# Altium footprint library PBL - THD Packages.PcbLib: 160 footprints (part 4 of 10)
Each footprint in its own frame and in the unit in brackets; x right, y up, seen from the top. Pads: shape width x height; smd on the part's side, far side on the other; paste and mask are expansions set on the pad; w line width, h text height; cw(c..) or ccw(c..) is an arc to the next point about the centre after c.
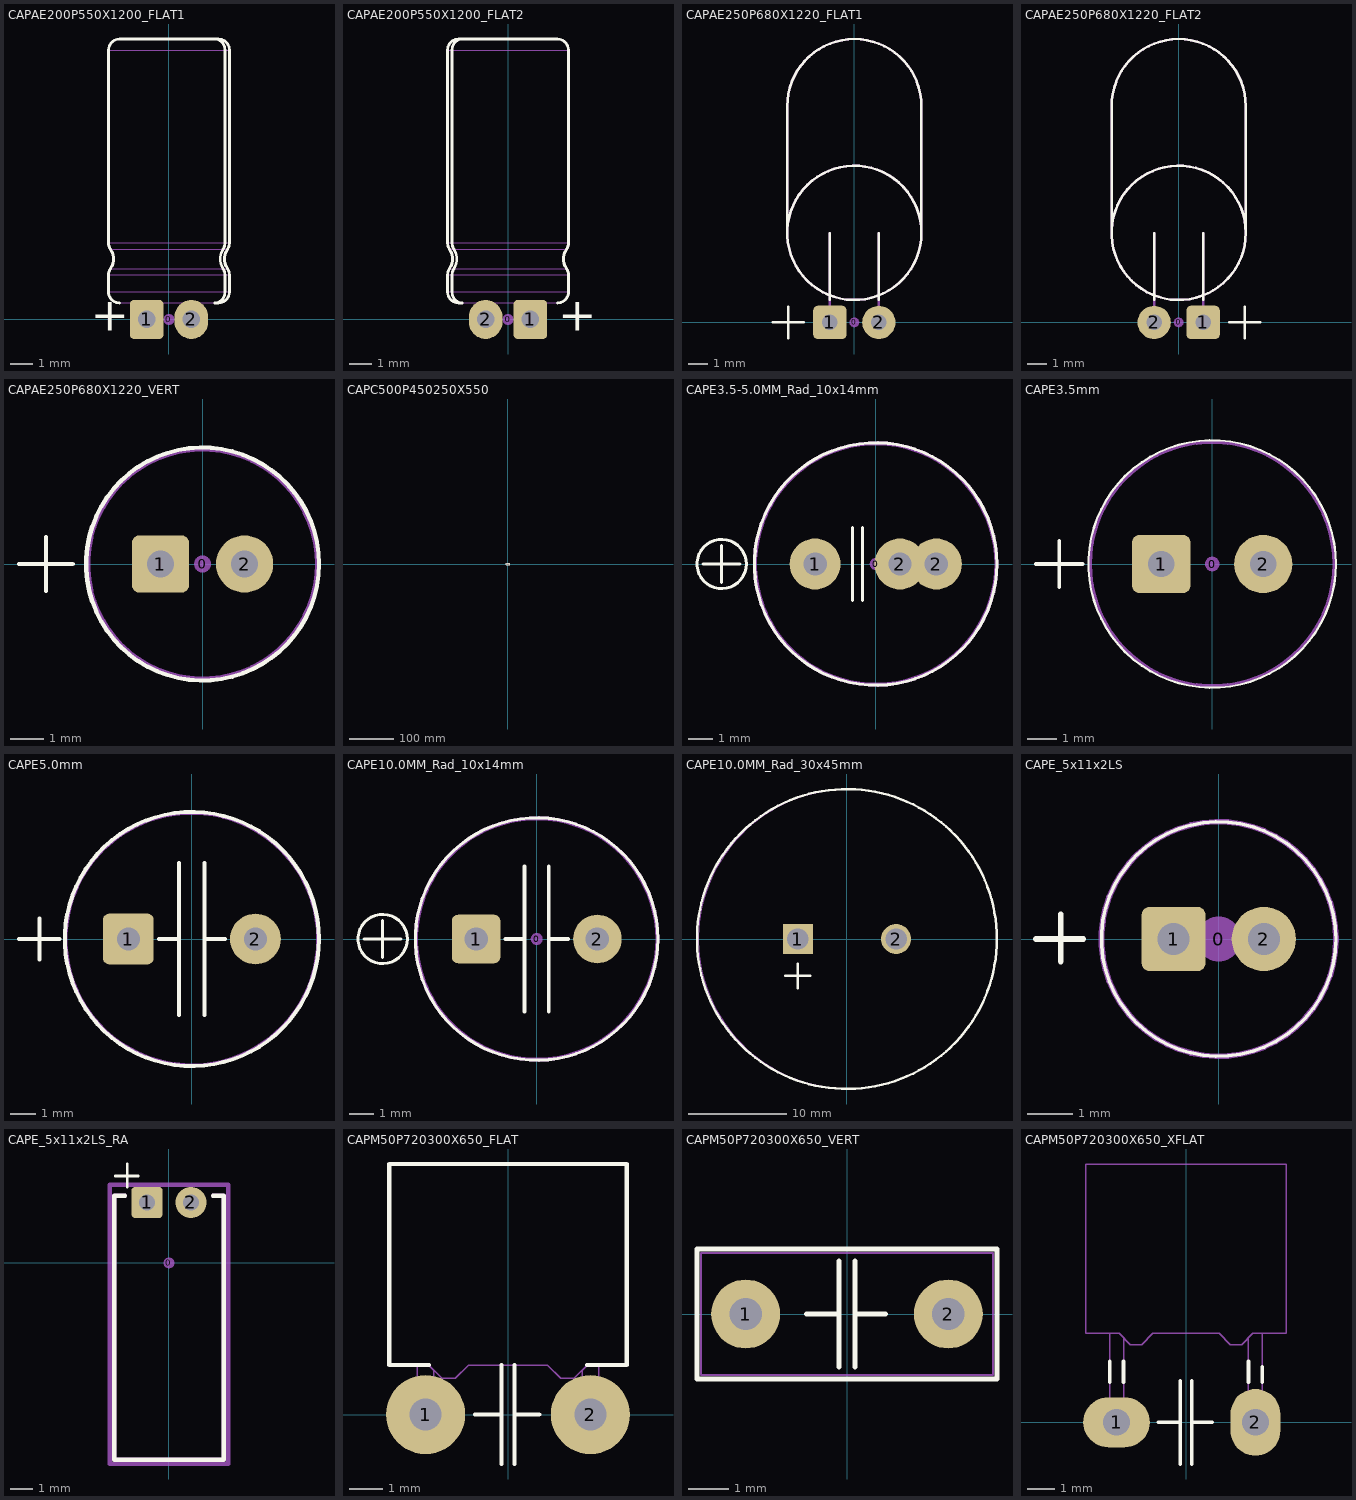
[diagram p3: the footprints below, top view; thin cyan lines are the x and y axes]

## CAPAE200P550X1200_FLAT1 [mil]
height 216.54
pads (3):
  round 20 on Mech15: 0(0,0)
  rrect25% 60x70 hole 31.5: 1(-40,0)
  oval 60x70 hole 31.5: 2(40,0)
Top Overlay:
  lines w5: -88.58,29.53 cw(c-88.58,49.25) -108.31,49.25 -108.31,79.64 cw(c-88.58,79.64) -104.79,90.88 ccw(c-129.92,108.31) -104.79,125.74 cw(c-88.58,136.98) -108.31,136.98 -108.31,482.32 cw(c-88.58,482.32) -88.58,502.05 81.84,502.05 cw(c81.06,483.05) 100.06,482.32 100.06,136.98 cw(c79.2,136.92) 96.81,125.74 ccw(c124.34,108.31) 96.81,90.88 cw(c79.2,79.7) 100.06,79.64 100.06,49.25 cw(c81.06,48.53) 81.84,29.53 ; 82.99,29.57 88.58,29.57 ccw(c88.58,49.25) 108.27,49.25 108.27,79.64 ccw(c88.58,79.64) 104.76,90.86 cw(c129.92,108.31) 104.76,125.76 ccw(c88.58,136.98) 108.27,136.98 108.27,482.32 ccw(c88.58,482.32) 88.58,502.01 82.99,502.01
  text "+" at -140,-20 h60
13 - 3D Top Side:
  lines w1.97: -49.21,19.68 -29.53,19.68 ; -49.21,29.53 -49.21,0 ccw(c-39.37,0) -29.53,0 -29.53,29.53 ; 29.53,19.68 49.21,19.68 ; 29.53,29.53 29.53,0 ccw(c39.37,0) 49.21,0 49.21,29.53 ; 82.99,29.57 88.58,29.57 ccw(c88.58,49.25) 108.27,49.25 ; 82.99,502.01 88.58,502.01 cw(c88.58,482.32) 108.27,482.32 ; -108.31,49.25 ccw(c-88.58,49.25) -88.58,29.53 81.84,29.53 ccw(c81.06,48.53) 100.06,49.25 100.06,79.64 ccw(c79.2,79.7) 96.81,90.88 ; -108.31,49.25 -108.31,79.64 ; -108.31,49.25 108.27,49.25 ; -108.31,79.64 cw(c-88.58,79.64) -104.79,90.88 ; -108.31,79.64 108.27,79.64 ; -108.31,136.98 ccw(c-88.58,136.98) -104.79,125.74 ; -108.31,136.98 -108.31,482.32 ; -108.31,136.98 108.27,136.98 ; -108.31,482.32 cw(c-88.58,482.32) -88.58,502.05 81.84,502.05 cw(c81.06,483.05) 100.06,482.32 100.06,136.98 cw(c79.2,136.92) 96.81,125.74 ; -108.31,482.32 108.27,482.32 ; -104.79,90.88 ccw(c-129.92,108.31) -104.79,125.74 ; -104.79,90.88 96.81,90.88 ; -104.79,125.74 96.81,125.74 ; 96.81,90.88 cw(c124.34,108.31) 96.81,125.74 ; 96.81,90.88 104.76,90.86 ; 96.81,125.74 104.76,125.76 ; 104.76,90.86 cw(c88.58,79.64) 108.27,79.64 ; 104.76,90.86 cw(c129.92,108.31) 104.76,125.76 ; 104.76,125.76 ccw(c88.58,136.98) 108.27,136.98 ; 108.27,49.25 108.27,79.64 ; 108.27,136.98 108.27,482.32
3D body: height 215.69, standoff -70, extent -107.37,-9.82 107.35,502.05

## CAPAE200P550X1200_FLAT2 [mil]
height 216.54
pads (3):
  round 20 on Mech15: 0(0,0)
  rrect25% 60x70 hole 31.5: 1(40,0)
  oval 60x70 hole 31.5: 2(-40,0)
Top Overlay:
  lines w5: -82.99,29.57 -88.58,29.57 cw(c-88.58,49.25) -108.27,49.25 -108.27,79.64 cw(c-88.58,79.64) -104.76,90.86 ccw(c-129.92,108.31) -104.76,125.76 cw(c-88.58,136.98) -108.27,136.98 -108.27,482.32 cw(c-88.58,482.32) -88.58,502.01 -82.99,502.01 ; -81.84,29.53 cw(c-81.06,48.53) -100.06,49.25 -100.06,79.64 cw(c-79.2,79.7) -96.81,90.88 ccw(c-124.34,108.31) -96.81,125.74 cw(c-79.2,136.92) -100.06,136.98 -100.06,482.32 cw(c-81.06,483.05) -81.84,502.05 88.58,502.05 cw(c88.58,482.32) 108.31,482.32 108.31,136.98 cw(c88.58,136.98) 104.79,125.74 ccw(c129.92,108.31) 104.79,90.88 cw(c88.58,79.64) 108.31,79.64 108.31,49.25 cw(c88.58,49.25) 88.58,29.53
  text "+" at 90,-20 h60
13 - 3D Top Side:
  lines w1.97: -82.99,29.57 -88.58,29.57 cw(c-88.58,49.25) -108.27,49.25 ; -82.99,502.01 -88.58,502.01 ccw(c-88.58,482.32) -108.27,482.32 ; -49.21,19.68 -29.53,19.68 ; -49.21,29.53 -49.21,0 ccw(c-39.37,0) -29.53,0 -29.53,29.53 ; 29.53,19.68 49.21,19.68 ; 29.53,29.53 29.53,0 ccw(c39.37,0) 49.21,0 49.21,29.53 ; -108.27,49.25 108.31,49.25 ; -108.27,49.25 -108.27,79.64 ; -108.27,79.64 cw(c-88.58,79.64) -104.76,90.86 ; -108.27,79.64 108.31,79.64 ; -108.27,136.98 ccw(c-88.58,136.98) -104.76,125.76 ; -108.27,136.98 108.31,136.98 ; -108.27,136.98 -108.27,482.32 ; -108.27,482.32 108.31,482.32 ; -104.76,90.86 ccw(c-129.92,108.31) -104.76,125.76 ; -104.76,90.86 -96.81,90.88 ; -104.76,125.76 -96.81,125.74 ; -96.81,90.88 ccw(c-124.34,108.31) -96.81,125.74 ; -96.81,90.88 ccw(c-79.2,79.7) -100.06,79.64 -100.06,49.25 ccw(c-81.06,48.53) -81.84,29.53 88.58,29.53 ccw(c88.58,49.25) 108.31,49.25 ; -96.81,90.88 104.79,90.88 ; -96.81,125.74 cw(c-79.2,136.92) -100.06,136.98 -100.06,482.32 cw(c-81.06,483.05) -81.84,502.05 88.58,502.05 cw(c88.58,482.32) 108.31,482.32 ; -96.81,125.74 104.79,125.74 ; 104.79,90.88 cw(c129.92,108.31) 104.79,125.74 ; 104.79,90.88 cw(c88.58,79.64) 108.31,79.64 ; 104.79,125.74 ccw(c88.58,136.98) 108.31,136.98 ; 108.31,49.25 108.31,79.64 ; 108.31,136.98 108.31,482.32
3D body: height 215.69, standoff -70, extent -107.33,-9.82 107.39,502.05

## CAPAE250P680X1220_FLAT1 [mm]
height 6.8
pads (3):
  round 0.508 on Mech15: 0(0,0)
  rrect25% 1.7x1.7 hole 0.8: 1(-1.25,0)
  round 1.7 hole 0.8: 2(1.25,0)
Top Overlay:
  circle w0.127: c0,4.572 r3.429
  lines w0.127: -4.18,0 -2.58,0 ; -3.429,4.572 -3.429,11.049 cw(c0,11.049) 3.429,11.049 3.429,4.572 ; -3.38,-0.8 -3.38,0.8 ; -1.25,1.143 -1.25,4.552 ; 1.25,1.143 1.25,4.552
13 - 3D Top Side:
  circle w0.127: c0,4.572 r3.429
  lines w0.127: -3.429,4.572 -3.429,11.049 cw(c0,11.049) 3.429,11.049 3.429,4.572 ; -1.25,0 -1.25,4.552 ; 1.25,0 1.25,4.552
3D body: height 6.77, standoff -1.78, extent -3.372,-0.249 3.371,12.952

## CAPAE250P680X1220_FLAT2 [mm]
height 6.8
pads (3):
  round 0.508 on Mech15: 0(0,0)
  rrect25% 1.7x1.7 hole 0.8: 1(1.25,0)
  round 1.7 hole 0.8: 2(-1.25,0)
Top Overlay:
  circle w0.127: c0,4.572 r3.429
  lines w0.127: -3.429,4.572 -3.429,11.049 cw(c0,11.049) 3.429,11.049 3.429,4.572 ; -1.25,1.143 -1.25,4.552 ; 1.25,1.143 1.25,4.552 ; 2.58,0 4.18,0 ; 3.38,-0.8 3.38,0.8
13 - 3D Top Side:
  circle w0.127: c0,4.572 r3.429
  lines w0.127: -3.429,4.572 -3.429,11.049 cw(c0,11.049) 3.429,11.049 3.429,4.572 ; -1.25,0 -1.25,4.552 ; 1.25,0 1.25,4.552
3D body: height 6.77, standoff -1.78, extent -3.371,-0.249 3.372,12.952

## CAPAE250P680X1220_VERT [mm]
height 12.2
pads (3):
  round 0.508 on Mech15: 0(0,0)
  rrect25% 1.7x1.7 hole 0.8: 1(-1.25,0)
  round 1.7 hole 0.8: 2(1.25,0)
Top Overlay:
  circle w0.127: c0,0 r3.459
  lines w0.127: -5.45,0 -3.85,0 ; -4.65,-0.8 -4.65,0.8
13 - 3D Top Side:
  circle w0.127: c0,0 r3.4
3D body: height 12.2, standoff -1.78, extent -3.372,-3.372 3.371,3.372

## CAPC500P450250X550 [mm] "TDK FK24 radial ceramic capacitor"
height 5.5
pads (3):
  round 0.508 on Mech15: 0(0,0)
  rrect25% 1.905x1.905 hole 0.8: 1(-2.5,0)
  round 1.905 hole 0.8: 2(2.5,0)
Top Overlay:
  lines w0.127: -3.81,-1.27 3.81,-1.27 3.81,1.27 -3.81,1.27 -3.81,-1.27
13 - 3D Top Side:
  lines w0.127: -2.5,-0.3 cw(c-2.5,0) -2.5,0.3 ; -2.25,-0.523 -2.248,-0.511 -2.24,-0.497 -2.227,-0.48 -2.21,-0.461 -2.186,-0.439 -2.157,-0.415 -2.122,-0.387 -2.083,-0.357 -2.046,-0.327 -2.006,-0.292 -1.995,-0.281 -1.983,-0.268 -1.972,-0.254 -1.962,-0.238 -1.958,-0.229 -1.955,-0.218 -1.954,-0.211 -1.953,-0.203 ; -2.25,0.523 cw(c-3.279,-0.727) -1.953,0.203 ; -2.236,-0.718 cw(c-1.896,-0.22) -2.5,-0.217 -2.5,0.217 cw(c-1.896,0.221) -2.232,0.723 -2.23,0.724 -2.206,0.741 ; -2.232,-0.723 -2.225,-0.727 -2.205,-0.742 ; 2.205,0.742 2.225,0.727 2.232,0.723 ; 2.206,-0.741 2.23,-0.724 2.232,-0.723 ccw(c1.896,-0.221) 2.5,-0.217 2.5,0.217 ccw(c1.896,0.22) 2.236,0.718 ; 2.25,-0.523 2.243,-0.502 2.225,-0.477 2.187,-0.44 2.134,-0.397 2.073,-0.349 2.007,-0.293 1.986,-0.271 1.967,-0.246 1.956,-0.223 1.953,-0.203 ; 2.25,0.523 2.24,0.497 2.21,0.461 2.157,0.415 2.083,0.357 2.046,0.327 2.006,0.292 1.983,0.268 1.962,0.238 1.955,0.218 1.953,0.203 ; 2.5,-0.3 ccw(c2.5,0) 2.5,0.3 ; -1.953,-0.203 -1.953,0.203 ; -1.953,-0.203 1.953,-0.203 ; -1.953,0.203 1.953,0.203 ; -1.8,-1.003 cw(c-1.8,-0.553) -2.25,-0.553 -2.25,0.553 cw(c-1.8,0.553) -1.8,1.003 ; -1.8,-1.003 cw(c-1.777,-0.913) -1.867,-0.935 cw(c9.111,-1.292) -1.819,-0.203 -1.819,0.203 ccw(c-168.083,-10.401) -1.867,0.935 cw(c-1.777,0.912) -1.8,1.003 ; -1.8,-1.003 1.8,-1.003 ; -1.8,1.003 1.8,1.003 ; 1.8,-1.003 ccw(c1.8,-0.553) 2.25,-0.553 2.25,0.553 ccw(c1.8,0.553) 1.8,1.003 ; 1.8,-1.003 ccw(c1.777,-0.912) 1.867,-0.935 cw(c168.269,10.414) 1.819,-0.203 1.819,0.203 ccw(c-9.111,1.292) 1.867,0.935 ccw(c1.777,0.913) 1.8,1.003 ; 1.953,-0.203 1.953,0.203
3D body: height 5.47, standoff -2.54, extent -2.797,-1.003 2.798,1.003

## CAPE3.5-5.0MM_Rad_10x14mm [mm] "3.5 & 5.0mm Pitch Radial Capacitor 10x14mm DxH"
height 14
pads (4):
  round 0.5 on Mech15: 0(0,0)
  round 2.1 hole 0.965: 1(-2.5,0) 2(1,0) 2(2.5,0)
Top Overlay:
  circle w0.127: c0,0 r5
  circle w0.127: c-6.35,0 r1.016
  lines w0.127: -7.112,0 -5.588,0 ; -6.35,-0.762 -6.35,0.762 ; -0.95,-1.5 -0.95,1.5 ; -0.55,-1.5 -0.55,1.5
13 - 3D Top Side:
  circle w0.127: c0,0 r4.953
15 - Top Courtyards:
  circle w0.127: c0,0 r5
3D body: height 13.99, standoff -3.51, extent -5.25,-5.237 5.206,5.237

## CAPE3.5mm [mm]
pads (3):
  round 0.508 on Mech15: 0(0,0)
  rrect25% 2x2 hole 0.9: 1(-1.75,0)
  round 2 hole 0.9: 2(1.75,0)
Top Overlay:
  circle w0.076: c0,0 r4.25
  lines w0.127: -6.05,0 -4.45,0 ; -5.25,-0.8 -5.25,0.8
13 - 3D Top Side:
  circle w0.127: c0,0 r4.191
3D body: height 7.1, standoff 0.1, extent -4.25,-4.25 4.216,4.233

## CAPE5.0mm [mm]
height 20
pads (2):
  rrect25% 2x2 hole 0.9: 1(-2.5,0)
  round 2 hole 0.9: 2(2.5,0)
Top Overlay:
  circle w0.152: c0,0 r5
  lines w0.152: -6.8,0 -5.2,0 ; -6,-0.8 -6,0.8 ; -1.3,0 -0.5,0 ; -0.5,-3 -0.5,3 ; 0.5,-3 0.5,3 ; 0.5,0 1.3,0
13 - 3D Top Side:
  circle w0.127: c0,-0.003 r4.953
3D body: height 20, standoff -3.5, extent -4.958,-4.968 4.953,4.961

## CAPE10.0MM_Rad_10x14mm [mm] "10mm Pitch Radial Capacitor 10x14mm DxH"
height 14
pads (3):
  round 0.5 on Mech15: 0(0,0)
  rrect25% 2x2 hole 0.965: 1(-2.5,0)
  round 2 hole 0.965: 2(2.5,0)
Top Overlay:
  circle w0.127: c0,0 r5
  circle w0.127: c-6.35,0 r1.016
  lines w0.127: -7.112,0 -5.588,0 ; -6.35,-0.762 -6.35,0.762
  lines w0.152: -1.3,0.003 -0.5,0.003 ; -0.5,-2.997 -0.5,3.003 ; 0.5,-2.997 0.5,3.003 ; 0.5,0.003 1.3,0.003
13 - 3D Top Side:
  circle w0.127: c0,0 r4.953
15 - Top Courtyards:
  circle w0.127: c0,0 r5
3D body: height 13.99, standoff -3.51, extent -5.25,-5.237 5.206,5.237

## CAPE10.0MM_Rad_30x45mm [mil] "10mm Pitch Radial Capacitor"
height 1771.65
pads (2):
  rect 120x120 hole 86: 1(-196.85,0)
  round 120 hole 86: 2(196.85,0)
Top Overlay:
  circle w10: c0,0 r600.39
  lines w10: -246.06,-147.64 -147.64,-147.64 ; -196.85,-196.85 -196.85,-98.43
15 - Top Courtyards:
  circle w5: c3.15,0 r597.8
3D body: height 1771.65, standoff -137.8, extent -585.73,-588.1 589.23,588.11

## CAPE_5x11x2LS [mil] "Capacitor, electrolytic, radial can"
height 433.07
pads (3):
  round 39.37 on Mech15: 0(0,0)
  rrect25% 56x56 hole 28: 1(-39.37,0)
  round 56 hole 28: 2(39.37,0)
Top Overlay:
  circle w3: c0,0 r102.36
  lines w5: -159.45,0 -118.11,0 ; -137.8,-19.68 -137.8,21.65
13 - 3D Top Side:
  circle w5: c0,0 r102.36
3D body: height 433.07, standoff -86.61, extent -98.42,-98.42 98.43,98.43

## CAPE_5x11x2LS_RA [mil] "Capacitor, electrolytic, radial can, laid over"
height 196.85
pads (3):
  round 19.68 on Mech15: 0(0,0)
  rrect25% 56x56 hole 28: 1(-39.37,108.27)
  round 56 hole 28: 2(39.37,108.27)
Top Overlay:
  lines w5: -96.46,155.51 -55.12,155.51 ; -74.8,135.83 -74.8,177.17
  lines w7.87: -78.74,120.08 -98.43,120.08 -98.43,-352.36 0,-352.36 98.43,-352.36 98.43,120.08 78.74,120.08
13 - 3D Top Side:
  lines w7.87: -78.74,120.08 -98.43,120.08 -98.43,-352.36 0,-352.36 98.43,-352.36 98.43,120.08 78.74,120.08
15 - Top Courtyards:
  lines w7.87: -106.3,-360.24 106.3,-360.24 106.3,139.76 -106.3,139.76 -106.3,-360.24
3D body: height 200.79, standoff -86.61, extent -98.42,-352.24 98.43,118.12

## CAPM50P720300X650_FLAT [mm] "Capacitor, THT, Metallized Polyester Film with 7.2x3.0x6.5mm LxTxH"
height 3
pads (2):
  round 2.4 hole 0.965: 1(-2.5,0) 2(2.5,0)
Top Overlay:
  lines w0.127: -2.4,1.5 -3.6,1.5 -3.6,7.6 3.6,7.6 3.6,1.5 2.4,1.5 ; -1,0 -0.2,0 ; -0.2,-1.5 -0.2,1.5 ; 0.2,-1.5 0.2,1.5 ; 0.2,0 0.95,0
13 - 3D Top Side:
  lines w0.05: -2.75,0.75 -2.25,0.75 ; -2.75,1.5 -2.75,0 ccw(c-2.5,0) -2.25,0 -2.25,1.35 ; 2.25,0.75 2.75,0.75 ; 2.25,1.35 2.25,0 ccw(c2.5,0) 2.75,0 2.75,1.5 ; -3.6,1.5 -2.4,1.5 -2,1.1 -1.6,1.1 -1.2,1.5 1.2,1.5 1.6,1.1 2,1.1 2.4,1.5 3.6,1.5 3.6,7.6 -3.6,7.6 -3.6,1.5
3D body: height 3, standoff -1.78, extent -3.6,-0.249 3.6,7.6

## CAPM50P720300X650_VERT [mm] "Capacitor, THT, Metallized Polyester Film with 7.2x3.0x6.5mm LxTxH"
height 6.5
pads (2):
  round 1.7 / inner round 1.7 / far side round 2 hole 0.8: 1(-2.5,0) 2(2.5,0)
Top Overlay:
  lines w0.127: -1,0 -0.2,0 ; -0.2,-1.3 -0.2,1.3 ; 0.2,-1.3 0.2,1.3 ; 0.2,0 0.95,0 ; -3.7,-1.6 -3.7,1.6 3.7,1.6 3.7,-1.6 -3.7,-1.6
13 - 3D Top Side:
  lines w0.05: -3.6,-1.5 -3.6,1.5 3.6,1.5 3.6,-1.5 -3.6,-1.5
3D body: height 6.5, standoff -1.78, extent -3.6,-1.5 3.6,1.5

## CAPM50P720300X650_XFLAT [mm] "Capacitor, THT, Metallized Polyester Film with 7.2x3.0x6.5mm LxTxH"
height 2
pads (2):
  oval 2.4x1.8 hole 0.965: 1(-2.5,0)
  oval 1.8x2.4 hole 0.965: 2(2.5,0)
Top Overlay:
  lines w0.127: -2.75,1.45 -2.75,2.2 ; -2.25,1.45 -2.25,2.2 ; -1,0 -0.2,0 ; -0.2,-1.5 -0.2,1.5 ; 0.2,-1.5 0.2,1.5 ; 0.2,0 0.95,0 ; 2.25,1.45 2.25,2.2 ; 2.75,1.45 2.75,2
13 - 3D Top Side:
  lines w0.05: -2.75,0.45 -2.25,0.45 ; -2.75,3.2 -2.75,0 ccw(c-2.5,0) -2.25,0 -2.25,3.05 ; 2.25,0.45 2.75,0.45 ; 2.25,3.05 2.25,0 ccw(c2.5,0) 2.75,0 2.75,3.2 ; -3.6,3.2 -3.6,9.3 3.6,9.3 3.6,3.2 2.4,3.2 2,2.8 1.6,2.8 1.2,3.2 -1.2,3.2 -1.6,2.8 -2,2.8 -2.4,3.2 -3.6,3.2
3D body: height 2, standoff -1.78, extent -3.6,-0.249 3.6,9.3